# Altium schematic symbol library Ic%.SchLib: 452 symbols (part 10 of 12)
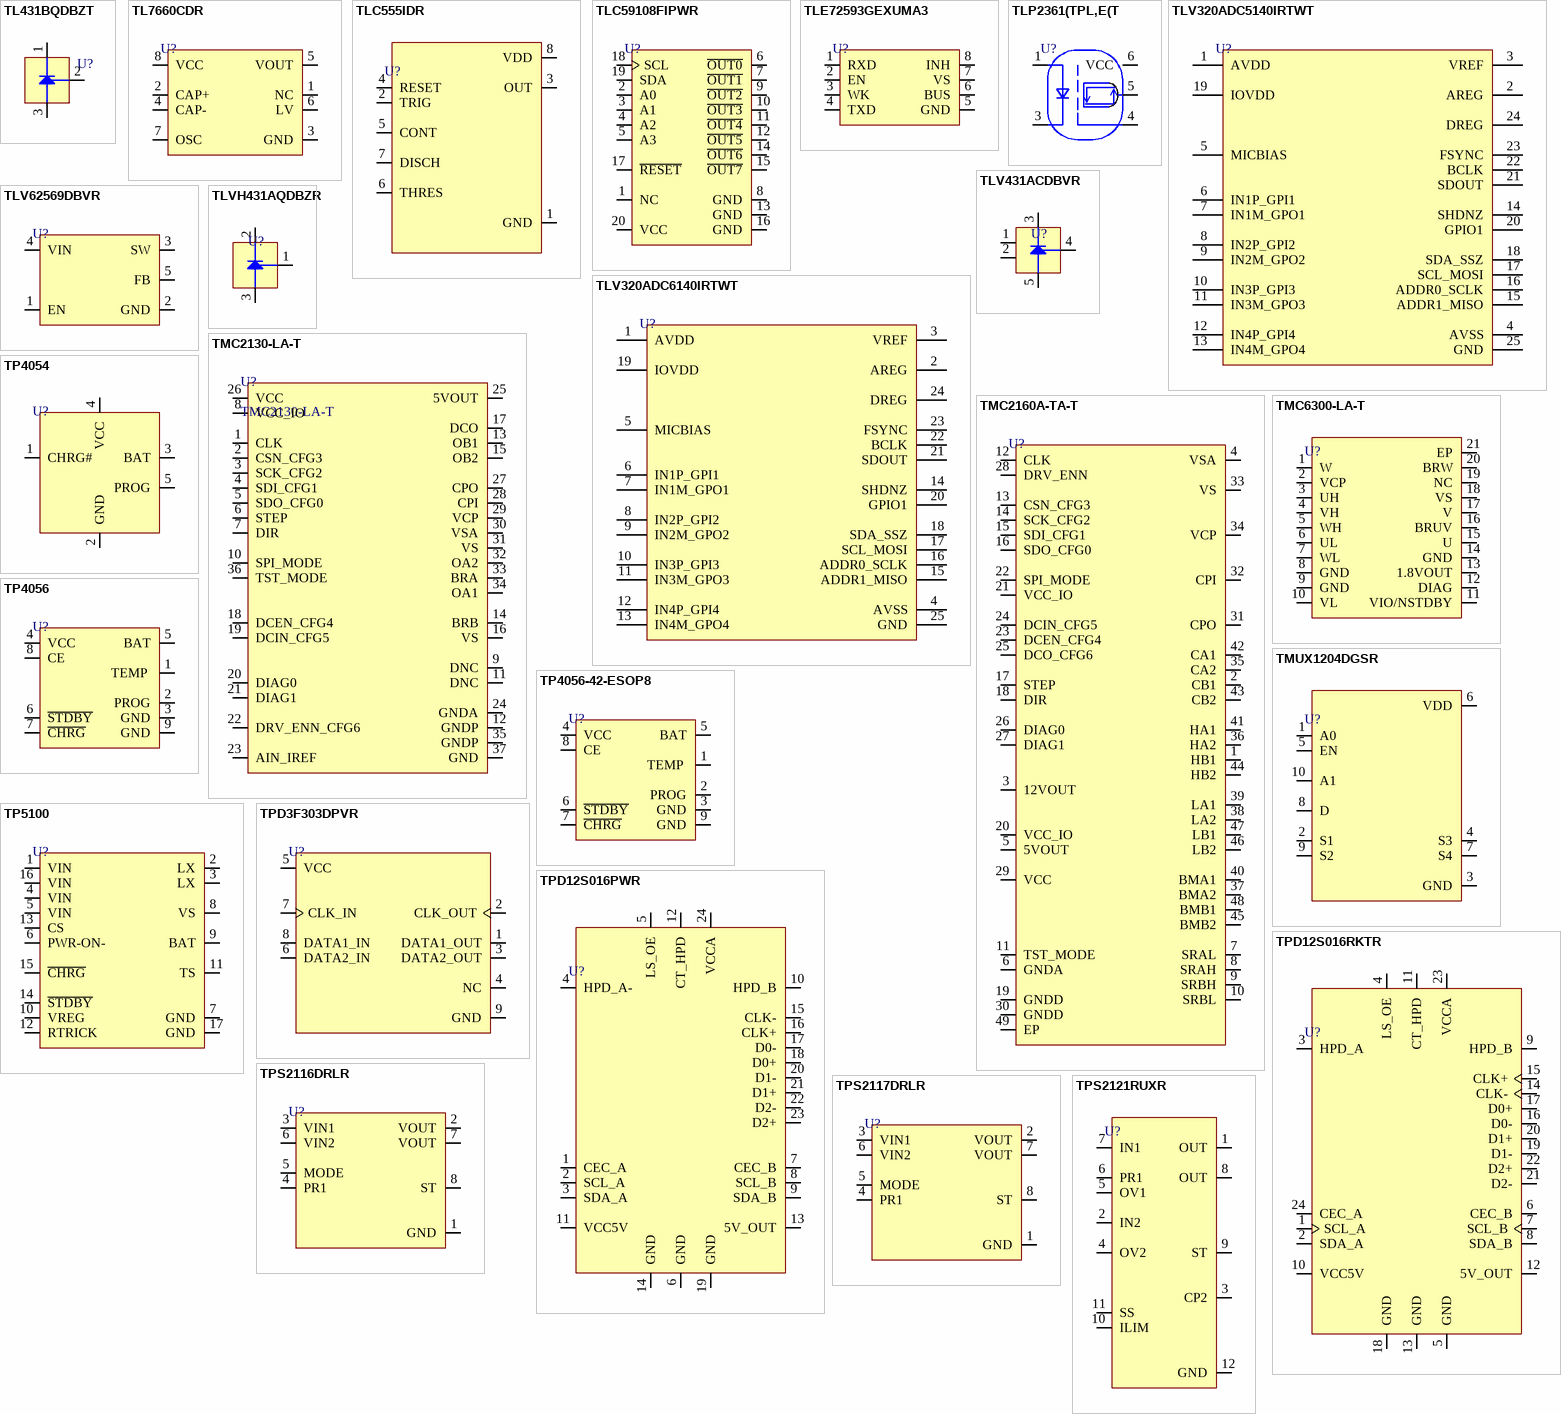
[diagram p32: symbols TL431BQDBZT to TPS2121RUXR]

## TL431BQDBZT
designator U?
IC VREF SHUNT ADJ 0.5% SOT23-3; Manufacturer: Texas Instruments; Manufacturer Part Number: TL431BQDBZT; Max Supply Voltage: 37V; Output Voltage: 36V; Max Output current: 100mA; Min Output Voltage: 2.495V; Cathode Current: 700uA; Temperature Coefficient: 92ppm/°C; Reference Type: Shunt,Adjustable; Output Type: Adjustable; Supplier: Mouser; LCSC Part Number: C2864384; RoHS: Yes; Item Type: IC; Stock: 34135; Pricing: 1=0.88, 10=0.633, 50=0.57, 100=0.501, 1000=0.415, 10000=0.397 (USD); Case/Package: SOT-23-3; Pins: 3; Min Operating Temperature: -40°C; Max Operating Temperature: 125°C; Tolerance: 0.5%; Packaging: Tape and Reel; Package Quantity: 250; Max Output Voltage: 36V; Output Current: 100mA; Series: -; Reference Voltage: 36V; Thickness: 1mm; Radiation Hardening: No; Lead Free: Lead Free; RoHS Compliant: Yes; ComponentLink1URL: https://datasheet.ciiva.com/15148/getdatasheetpartid-48480-15148279.pdf?src-supplier=Verical; ComponentLink1Description: https://datasheet.ciiva.com/15148/getdatasheetpartid-48480-15148279.pdf?src-supplier=Verical; ComponentLink2URL: https://datasheet.ciiva.com/2012/tl431a-2012112.pdf?src-supplier=Digikey; ComponentLink2Description: https://datasheet.ciiva.com/2012/tl431a-2012112.pdf?src-supplier=Digikey; ComponentLink3URL: https://datasheet.ciiva.com/2012/tl431a-2012111.pdf?src-supplier=Digikey; ComponentLink3Description: https://datasheet.ciiva.com/2012/tl431a-2012111.pdf?src-supplier=Digikey; ComponentLink4URL: https://datasheet.ciiva.com/2012/tl431a-2012113.pdf?src-supplier=Digikey; ComponentLink4Description: https://datasheet.ciiva.com/2012/tl431a-2012113.pdf?src-supplier=Digikey; ComponentLink5URL: https://datasheet.ciiva.com/14366/tl432b-14366103.pdf?src-supplier=Avnet; ComponentLink5Description: https://datasheet.ciiva.com/14366/tl432b-14366103.pdf?src-supplier=Avnet
footprint SOT-23 (TRANS NPN 40V 0.6A SOT23)
pins: 1 Cathode, 2 REF, 3 Anode

## TL7660CDR
designator U?
Charge Pump INV/STPUP/STPDN -1.5V to -10V 100mA 8-Pin SOIC T/R / IC REG SWITCHD CAP INV 8SOIC; Manufacturer: Texas Instruments; Manufacturer Part Number: TL7660CDR; Supplier: Digi-Key; Supplier Part Number: 296-21856-1-ND; RoHS: Yes; Category: Voltage Regulators - Switching; Stock: 5011; Pricing: 1=1.15, 10=1.024, 25=0.9716, 100=0.798, 250=0.746, 500=0.65926, 1000=0.52046 (USD); ComponentLink1URL: https://datasheet.ciiva.com/15114/getdatasheetpartid-314156-15114111.pdf?src-supplier=Verical; ComponentLink1Description: https://datasheet.ciiva.com/15114/getdatasheetpartid-314156-15114111.pdf?src-supplier=Verical; ComponentLink2URL: https://datasheet.ciiva.com/2033/tl7660-2033856.pdf?src-supplier=Digi-Key; ComponentLink2Description: https://datasheet.ciiva.com/2033/tl7660-2033856.pdf?src-supplier=Digi-Key; ComponentLink3URL: https://datasheet.ciiva.com/41462/001014582-da-01-en-ic-reg-multi-config-tl7660cdr-soic-8-tid-41462430.pdf?src-supplier=Conrad; ComponentLink3Description: https://datasheet.ciiva.com/41462/001014582-da-01-en-ic-reg-multi-config-tl7660cdr-soic-8-tid-41462430.pdf?src-supplier=Conrad; ComponentLink4URL: https://datasheet.ciiva.com/3216/tl7660-3216343.pdf?src-supplier=Avnet; ComponentLink4Description: https://datasheet.ciiva.com/3216/tl7660-3216343.pdf?src-supplier=Avnet; ComponentLink5URL: https://datasheet.ciiva.com/2033/tl7660-2033857.pdf?src-supplier=Digi-Key; ComponentLink5Description: https://datasheet.ciiva.com/2033/tl7660-2033857.pdf?src-supplier=Digi-Key; ComponentLink6URL: https://datasheet.ciiva.com/2033/tl7660-2033858.pdf?src-supplier=Digi-Key; ComponentLink6Description: https://datasheet.ciiva.com/2033/tl7660-2033858.pdf?src-supplier=Digi-Key; LCSC Part Number: C130206; Item Type: IC
footprint SOIC-8(0.154", 3.90mm Width)
pins: 1 NC, 2 CAP+, 3 GND, 4 CAP-, 5 VOUT, 6 LV, 7 OSC, 8 VCC

## TLC555IDR
designator U?
IC OSC SGL TIMER 2.1MHZ 8-SOIC; Manufacturer: Texas Instruments; Manufacturer Part Number: TLC555IDR; Min Supply Voltage: 2V; Max Supply Voltage: 15V; Max Power Dissipation: 725mW; Number of Timers/Counters: 1; Operating Supply Current: 360uA; High Level Output Current: -10mA; Low Level Output Current: 100mA; Quiescent Current: 250uA; Supplier: Mouser; LCSC Part Number: C6987; RoHS: Yes; Item Type: IC; Stock: 287; Pricing: 1=0.73, 10=0.518, 50=0.465, 100=0.408, 1000=0.344, 10000=0.275 (USD); Mounting Technology: Surface Mount; Case/Package: SOIC; Pins: 8; Weight: 0.002561oz; Min Operating Temperature: -40°C; Max Operating Temperature: 125°C; Packaging: Tape and Reel; Frequency: 2.1MHz; Package Quantity: 2500; Series: LinCMOS™; Power Dissipation: 725mW; Length: 4.9mm; Width: 3.91mm; Height: 1.58mm; Thickness: 1.58mm; Radiation Hardening: No; Lead Free: Lead Free; RoHS Compliant: Yes; Reach SVHC Compliant: No; ComponentLink1URL: https://datasheet.ciiva.com/4772/slfs043f-205695-4772689.pdf?src-supplier=Mouser; ComponentLink1Description: https://datasheet.ciiva.com/4772/slfs043f-205695-4772689.pdf?src-supplier=Mouser; ComponentLink2URL: https://datasheet.ciiva.com/1233/tlc555-1233330.pdf?src-supplier=Digikey; ComponentLink2Description: https://datasheet.ciiva.com/1233/tlc555-1233330.pdf?src-supplier=Digikey; ComponentLink3URL: https://datasheet.ciiva.com/1233/tlc555-1233329.pdf?src-supplier=Digikey; ComponentLink3Description: https://datasheet.ciiva.com/1233/tlc555-1233329.pdf?src-supplier=Digikey; ComponentLink4URL: https://datasheet.ciiva.com/1233/tlc555-1233331.pdf?src-supplier=Digikey; ComponentLink4Description: https://datasheet.ciiva.com/1233/tlc555-1233331.pdf?src-supplier=Digikey; ComponentLink5URL: https://datasheet.ciiva.com/1492/1834067-1492588.pdf?src-supplier=Element14; ComponentLink5Description: https://datasheet.ciiva.com/1492/1834067-1492588.pdf?src-supplier=Element14; ComponentLink6URL: https://datasheet.ciiva.com/14274/tlc555-14274507.pdf?src-supplier=Avnet; ComponentLink6Description: https://datasheet.ciiva.com/14274/tlc555-14274507.pdf?src-supplier=Avnet
footprint SOIC-8(0.154", 3.90mm Width)
pins: 1 GND, 2 TRIG, 3 OUT, 4 RESET, 5 CONT, 6 THRES, 7 DISCH, 8 VDD

## TLC59108FIPWR
designator U?
IC LED DRVR LINEAR 120MA 20TSSOP; Manufacturer: Texas Instruments; Manufacturer Part Number: TLC59108FIPWR; Supplier: Mouser; LCSC Part Number: C2678527; RoHS: Yes; Item Type: IC; Stock: 2546; Pricing: 1=1.8, 10=1.62, 50=1.62, 100=1.3, 1000=0.882, 10000=0.76 (USD); ComponentLink1URL: https://datasheet.ciiva.com/15136/getdatasheetpartid-186119-15136035.pdf?src-supplier=Verical; ComponentLink1Description: https://datasheet.ciiva.com/15136/getdatasheetpartid-186119-15136035.pdf?src-supplier=Verical; ComponentLink2URL: https://datasheet.ciiva.com/1945/tlc59108f-1945732.pdf?src-supplier=Digikey; ComponentLink2Description: https://datasheet.ciiva.com/1945/tlc59108f-1945732.pdf?src-supplier=Digikey; ComponentLink3URL: https://datasheet.ciiva.com/3165/tlc59108f-3165330.pdf?src-supplier=Avnet; ComponentLink3Description: https://datasheet.ciiva.com/3165/tlc59108f-3165330.pdf?src-supplier=Avnet; ComponentLink4URL: https://datasheet.ciiva.com/1945/tlc59108f-1945733.pdf?src-supplier=Digikey; ComponentLink4Description: https://datasheet.ciiva.com/1945/tlc59108f-1945733.pdf?src-supplier=Digikey; ComponentLink5URL: https://datasheet.ciiva.com/1945/tlc59108f-1945734.pdf?src-supplier=Digikey; ComponentLink5Description: https://datasheet.ciiva.com/1945/tlc59108f-1945734.pdf?src-supplier=Digikey
footprint TSSOP-20
pins: 1 NC "No internal connection", 2 A0 "Address input 0", 3 A1 "Address input 1", 4 A2 "Address input 2", 5 A3 "Address input 3", 6 ~{OUT0} "Constant current output 0, LED ON at low", 7 ~{OUT1} "Constant current output 1, LED ON at low", 8 GND "Ground", 9 ~{OUT2} "Constant current output 2, LED ON at low", 10 ~{OUT3} "Constant current output 3, LED ON at low", 11 ~{OUT4} "Constant current output 4, LED ON at low", 12 ~{OUT5} "Constant current output 5, LED ON at low", 13 GND "Ground", 14 ~{OUT6} "Constant current output 6, LED ON at low", 15 ~{OUT7} "Constant current output 7, LED ON at low", 16 GND "Ground", 17 ~{RESET} "Active-low reset input", 18 SCL "Serial clock input", 19 SDA "Serial data input/output", 20 VCC "Power supply"

## TLE72593GEXUMA3
designator U?
IC TRANSCEIVER 1/1 PGDSO816; Manufacturer: Infineon; Manufacturer Part Number: TLE72593GEXUMA3; Operating Supply Voltage: 3.3V; Data Rate: 20Kbps; Receiver Hysteresis: 120mV; Quiescent Current: 10A; Supplier: Mouser; LCSC Part Number: 726-TLE72593GEXUMA3; RoHS: Yes; Item Type: IC; Stock: 3950; Pricing: 1=1.75, 10=1.17, 50=1.05, 100=0.88, 1000=0.608, 10000=0.608 (USD); Mounting Technology: Surface Mount; Case/Package: SOIC; Pins: 8; Min Operating Temperature: -40°C; Max Operating Temperature: 150°C; Packaging: Cut Tape; Package Quantity: 2500NUMBER; Series: -; RoHS Compliant: Yes; Lead Free: Lead Free; Halogen Free: Halogen Free
footprint SOIC-8(0.154", 3.90mm Width)
pins: 1 RXD, 2 EN, 3 WK, 4 TXD, 5 GND, 6 BUS, 7 VS, 8 INH

## TLP2361(TPL,E(T
designator U?
15Mbit/s 80ns 2.7V~5.5V 20kV/us DC SO-5 Logic Output Optoisolators ROHS; Manufacturer: Toshiba; Manufacturer Part Number: TLP2361(TPL,E(T; Supplier: Arrow Electronics; LCSC Part Number: C107626; RoHS: No; Stock: 15000; Pricing: 3000=0.3233, 6000=0.3199, 9000=0.3167, 12000=0.3136, 15000=0.3102, 30000=0.3071 (USD); ComponentLink1URL: https://datasheet.octopart.com/TLP2361%28TPL%2CE%28T-Toshiba-datasheet-62094047.pdf?src-supplier=TME; ComponentLink1Description: https://datasheet.octopart.com/TLP2361%28TPL%2CE%28T-Toshiba-datasheet-62094047.pdf?src-supplier=TME; Item Type: Optoisolator
footprint SO-5
pins: 1 AN, 3 CAT, 4 GND, 5 VO, 6 VCC

## TLV320ADC5140IRTWT
designator U?
IC ADC AUDIO 768K 24WQFN; Manufacturer: Texas Instruments; Manufacturer Part Number: TLV320ADC5140IRTWT; Supplier 1: Digi-Key; RoHS: Yes; Stock 1: 40; Pricing 1: 1=6.07000, 10=5.44900, 25=5.15160, 100=4.46470 (USD); RoHS Compliant: Yes; ComponentLink1URL: http://www.ti.com/general/docs/suppproductinfo.tsp?distId=10&amp;gotoUrl=http%3A%2F%2Fwww.ti.com%2Flit%2Fgpn%2Ftlv320adc5140&src-supplier=Digi-Key; ComponentLink1Description: http://www.ti.com/general/docs/suppproductinfo.tsp?distId=10&amp;gotoUrl=http%3A%2F%2Fwww.ti.com%2Flit%2Fgpn%2Ftlv320adc5140&src-supplier=Digi-Key; Supplier Part Number 1: 296-TLV320ADC5140IRTWTCT-ND; LCSC Part Number: C1852018; Item Type: IC
footprint 24-WQFN (4x4)
pins: 1 AVDD, 2 AREG, 3 VREF, 4 AVSS, 5 MICBIAS, 6 IN1P_GPI1, 7 IN1M_GPO1, 8 IN2P_GPI2, 9 IN2M_GPO2, 10 IN3P_GPI3, 11 IN3M_GPO3, 12 IN4P_GPI4, 13 IN4M_GPO4, 14 SHDNZ, 15 ADDR1_MISO, 16 ADDR0_SCLK, 17 SCL_MOSI, 18 SDA_SSZ, 19 IOVDD, 20 GPIO1, 21 SDOUT, 22 BCLK, 23 FSYNC, 24 DREG, 25 GND

## TLV320ADC6140IRTWT
designator U?
IC ADC AUDIO 768K 24WQFN; Manufacturer: Texas Instruments; Manufacturer Part Number: TLV320ADC6140IRTWT; Supplier 1: Digi-Key; RoHS: Yes; Category: Amplifiers - Audio; Stock 1: 4324; Pricing 1: 1=13.36000, 10=12.27500, 25=11.76600, 100=10.36680 (USD); ComponentLink1URL: http://www.ti.com/general/docs/suppproductinfo.tsp?distId=10&amp;gotoUrl=http%3A%2F%2Fwww.ti.com%2Flit%2Fgpn%2Ftlv320adc6140&src-supplier=Digi-Key; ComponentLink1Description: http://www.ti.com/general/docs/suppproductinfo.tsp?distId=10&amp;gotoUrl=http%3A%2F%2Fwww.ti.com%2Flit%2Fgpn%2Ftlv320adc6140&src-supplier=Digi-Key; Supplier Part Number 1: 296-TLV320ADC6140IRTWTCT-ND; LCSC Part Number: C1852023; Item Type: IC
footprint 24-WQFN (4x4)
pins: 1 AVDD, 2 AREG, 3 VREF, 4 AVSS, 5 MICBIAS, 6 IN1P_GPI1, 7 IN1M_GPO1, 8 IN2P_GPI2, 9 IN2M_GPO2, 10 IN3P_GPI3, 11 IN3M_GPO3, 12 IN4P_GPI4, 13 IN4M_GPO4, 14 SHDNZ, 15 ADDR1_MISO, 16 ADDR0_SCLK, 17 SCL_MOSI, 18 SDA_SSZ, 19 IOVDD, 20 GPIO1, 21 SDOUT, 22 BCLK, 23 FSYNC, 24 DREG, 25 GND

## TLV431ACDBVR
designator U?
IC VREF SHUNT ADJ 1% SOT23-5; Manufacturer: Texas Instruments; Manufacturer Part Number: TLV431ACDBVR; Output Voltage: 6V; Max Supply Voltage: 7V; Max Output current: 15mA; Temperature Coefficient: 129ppm/°C; Cathode Current: 80uA; Min Output Voltage: 1.24V; Reference Type: Shunt,Adjustable; Output Type: Adjustable; Supplier: Mouser; LCSC Part Number: C60268; RoHS: Yes; Item Type: IC; Stock: 321; Pricing: 1=0.47, 10=0.394, 50=0.394, 100=0.295, 1000=0.179, 10000=0.139 (USD); Case/Package: SOT-23-5; Pins: 5; Weight: 0.000557oz; Min Operating Temperature: -40°C; Max Operating Temperature: 125°C; Packaging: Tape and Reel; Tolerance: 1%; Max Output Voltage: 6V; Output Current: 15mA; Series: -; Min Input Voltage: 1.24V; Reference Voltage: 6V; Termination: SMD/SMT; Radiation Hardening: No; Lead Free: Lead Free; RoHS Compliant: Yes; Reach SVHC Compliant: No; ComponentLink1URL: https://datasheet.ciiva.com/22698/1837046-22698668.pdf?src-supplier=Element14; ComponentLink1Description: https://datasheet.ciiva.com/22698/1837046-22698668.pdf?src-supplier=Element14; ComponentLink2URL: https://datasheet.ciiva.com/27049/761694-27049832.pdf?src-supplier=Jameco; ComponentLink2Description: https://datasheet.ciiva.com/27049/761694-27049832.pdf?src-supplier=Jameco; ComponentLink3URL: https://datasheet.ciiva.com/46383/1887487-46383135.pdf?src-supplier=Element14; ComponentLink3Description: https://datasheet.ciiva.com/46383/1887487-46383135.pdf?src-supplier=Element14; ComponentLink4URL: https://datasheet.ciiva.com/2006/tlv431a-2006237.pdf?src-supplier=Digikey; ComponentLink4Description: https://datasheet.ciiva.com/2006/tlv431a-2006237.pdf?src-supplier=Digikey; ComponentLink5URL: https://datasheet.ciiva.com/2006/tlv431a-2006236.pdf?src-supplier=Digikey; ComponentLink5Description: https://datasheet.ciiva.com/2006/tlv431a-2006236.pdf?src-supplier=Digikey; ComponentLink6URL: https://datasheet.ciiva.com/2006/tlv431a-2006238.pdf?src-supplier=Digikey; ComponentLink6Description: https://datasheet.ciiva.com/2006/tlv431a-2006238.pdf?src-supplier=Digikey
footprint SOT-23-5
pins: 1 NC, 2 NC, 3 K, 4 K, 5 A

## TLV62569DBVR
designator U?
IC REG BUCK ADJ 2A SOT23-5; Manufacturer: Texas Instruments; Manufacturer Part Number: TLV62569DBVR; Supplier: Mouser; LCSC Part Number: C141836; RoHS: Yes; Item Type: IC; Stock: 6385; Pricing: 1=0.47, 10=0.248, 50=0.248, 100=0.143, 1000=0.12, 10000=0.086 (USD); ComponentLink1URL: http://www.ti.com/lit/ds/symlink/tlv62569.pdf?src-supplier=Farnell; ComponentLink1Description: http://www.ti.com/lit/ds/symlink/tlv62569.pdf?src-supplier=Farnell; ComponentLink2URL: http://www.ti.com/lit/ds/symlink/tlv62569.pdf?src-supplier=Digikey; ComponentLink2Description: http://www.ti.com/lit/ds/symlink/tlv62569.pdf?src-supplier=Digikey
footprint SOT-23-5
pins: 1 EN, 2 GND, 3 SW, 4 VIN, 5 FB

## TLVH431AQDBZR
designator U?
IC VREF SHUNT ADJ 1% SOT23-3; Manufacturer: Texas Instruments; Manufacturer Part Number: TLVH431AQDBZR; Supplier: Mouser; Supplier Part Number: 595-TLVH431AQDBZR; RoHS: Yes; LCSC Part Number: C109228; Stock: 64111; Pricing: 1=0.7, 10=0.576, 50=0.576, 100=0.437, 1000=0.297, 10000=0.23 (USD); ComponentLink1URL: https://datasheet.ciiva.com/2006/tlvh431a-2006852.pdf?src-supplier=Digikey; ComponentLink1Description: https://datasheet.ciiva.com/2006/tlvh431a-2006852.pdf?src-supplier=Digikey; ComponentLink2URL: https://datasheet.ciiva.com/2006/tlvh431a-2006853.pdf?src-supplier=Digikey; ComponentLink2Description: https://datasheet.ciiva.com/2006/tlvh431a-2006853.pdf?src-supplier=Digikey; ComponentLink3URL: https://datasheet.ciiva.com/2006/tlvh431a-2006854.pdf?src-supplier=Digikey; ComponentLink3Description: https://datasheet.ciiva.com/2006/tlvh431a-2006854.pdf?src-supplier=Digikey; ComponentLink4URL: https://datasheet.ciiva.com/30001/tlvh432b-30001871.pdf?src-supplier=Avnet; ComponentLink4Description: https://datasheet.ciiva.com/30001/tlvh432b-30001871.pdf?src-supplier=Avnet; Item Type: IC
footprint SOT-23 (TRANS NPN 40V 0.6A SOT23)
pins: 1 REF, 2 Cathode, 3 Anode

## TMC2130-LA-T
designator U?
IC STEPPER MOTOR DVR SPI 36QFN; Manufacturer: Trinamic; Logic Function: AND GATE; Output Current: 1.4A; Supplier 1: Mouser; Manufacturer Part Number: TMC2130-LA-T; RoHS: Yes; Category: Motor Drivers; Stock 1: 19660; Pricing 1: 1=5.61000, 10=4.76000, 50=4.76000, 100=4.01000, 250=3.70000, 500=3.45000, 1000=2.90000, 2000=2.83000, 10000=2.83000 (USD); Mount: Surface Mount; Case/Package: QFN; Min Operating Temperature: -40°C; Max Operating Temperature: 125°C; Packaging: Tape and Reel; Interface: SPI; ComponentLink1URL: https://www.trinamic.com/fileadmin/assets/Products/ICs_Documents/TMC2130_datasheet.pdf?src-supplier=Digi-Key; ComponentLink1Description: https://www.trinamic.com/fileadmin/assets/Products/ICs_Documents/TMC2130_datasheet.pdf?src-supplier=Digi-Key; Supplier Part Number 1: 700-TMC2130-LA-T
footprint TMC2130-LA-T
pins: 1 CLK, 2 CSN_CFG3, 3 SCK_CFG2, 4 SDI_CFG1, 5 SDO_CFG0, 6 STEP, 7 DIR, 8 VCC_IO, 9 DNC, 10 SPI_MODE, 11 DNC, 12 GNDP, 13 OB1, 14 BRB, 15 OB2, 16 VS, 17 DCO, 18 DCEN_CFG4, 19 DCIN_CFG5, 20 DIAG0, 21 DIAG1, 22 DRV_ENN_CFG6, 23 AIN_IREF, 24 GNDA, 25 5VOUT, 26 VCC, 27 CPO, 28 CPI, 29 VCP, 30 VSA, 31 VS, 32 OA2, 33 BRA, 34 OA1, 35 GNDP, 36 TST_MODE, 37 GND

## TMC2160A-TA-T
designator U?
IC MTR DRV BIPOLAR 10-50V 48TQFP; Manufacturer: Trinamic; Manufacturer Part Number: TMC2160A-TA-T; Supplier: Mouser; Supplier Part Number: 700-TMC2160A-TA-T; RoHS: Yes; Stock: 9328; Pricing: 1=6.21, 10=5.28, 50=5.28, 100=4.57, 1000=3.48, 10000=3.11 (USD); LCSC Part Number: C465948; Item Type: IC
footprint 48-TQFP-EP(7x7)
pins: 1 HB1, 2 CB1, 3 12VOUT, 4 VSA, 5 5VOUT, 6 GNDA, 7 SRAL, 8 SRAH, 9 SRBH, 10 SRBL, 11 TST_MODE, 12 CLK, 13 CSN_CFG3, 14 SCK_CFG2, 15 SDI_CFG1, 16 SDO_CFG0, 17 STEP, 18 DIR, 19 GNDD, 20 VCC_IO, 21 VCC_IO, 22 SPI_MODE, 23 DCEN_CFG4, 24 DCIN_CFG5, 25 DCO_CFG6, 26 DIAG0, 27 DIAG1, 28 DRV_ENN, 29 VCC, 30 GNDD, 31 CPO, 32 CPI, 33 VS, 34 VCP, 35 CA2, 36 HA2, 37 BMA2, 38 LA2, 39 LA1, 40 BMA1, 41 HA1, 42 CA1, 43 CB2, 44 HB2, 45 BMB2, 46 LB2, 47 LB1, 48 BMB1, 49 EP

## TMC6300-LA-T
designator U?
BLDC MOTOR DRIVER 2-11V QFN20; Manufacturer: Trinamic; Manufacturer Part Number: TMC6300-LA-T; Item Type: IC; Supplier: Mouser; LCSC Part Number: C5274455; RoHS: No; Pricing: 1=3.73, 10=2.47, 50=2.11, 100=1.71, 1000=1.28, 10000=1.15 (USD); Series: -
footprint 20-QFN(3x3)
pins: 1 W, 2 VCP, 3 UH, 4 VH, 5 WH, 6 UL, 7 WL, 8 GND, 9 GND, 10 VL, 11 VIO/NSTDBY, 12 DIAG, 13 1.8VOUT, 14 GND, 15 U, 16 BRUV, 17 V, 18 VS, 19 NC, 20 BRW, 21 EP

## TMUX1204DGSR
designator U?
IC SWITCH SP4T X 1 5OHM 10VSSOP; Manufacturer: Texas Instruments; Manufacturer Part Number: TMUX1204DGSR; Supplier: Mouser; Supplier Part Number: 595-TMUX1204DGSR; RoHS: Yes; Item Type: IC; Stock: 10828; Pricing: 1=0.94, 10=0.776, 50=0.776, 100=0.589, 1000=0.401, 10000=0.325 (USD); ComponentLink1URL: http://www.ti.com/general/docs/suppproductinfo.tsp?distId=10&amp;gotoUrl=http%3A%2F%2Fwww.ti.com%2Flit%2Fgpn%2Ftmux1204&src-supplier=Digikey; ComponentLink1Description: http://www.ti.com/general/docs/suppproductinfo.tsp?distId=10&amp;gotoUrl=http%3A%2F%2Fwww.ti.com%2Flit%2Fgpn%2Ftmux1204&src-supplier=Digikey; LCSC Part Number: C2840022
footprint VSSOP-10
pins: 1 A0, 2 S1, 3 GND, 4 S3, 5 EN, 6 VDD, 7 S4, 8 D, 9 S2, 10 A1

## TP4054
designator U?
4.5V~5.5V 锂离子/Polymer 1 600mA SOT-23-5 Battery Management ICs ROHS; Manufacturer: TPOWER; Manufacturer Part Number: TP4054; Item Type: IC; Package: SOT-23-5; LCSC Part Number: C382138; ComponentLink1Description: LCSC; ComponentLink1URL: https://www.lcsc.com/product-detail/Battery-Management-ICs_TPOWER-TP4054_C382138.html
footprint SOT-23-5
pins: 1 CHRG#, 2 GND, 3 BAT, 4 VCC, 5 PROG

## TP4056
designator U?
3.7V~6.5V Lithium-ion 1 1000mA ESOP-8 Battery Management ROHS; Manufacturer: UMW(Youtai Semiconductor Co., Ltd.); Manufacturer Part Number: TP4056; Item Type: IC; Package: ESOP-8; LCSC Part Number: C725790; ComponentLink1Description: LCSC; ComponentLink1URL: https://www.lcsc.com/product-detail/Battery-Management_UMW-Youtai-Semiconductor-Co-Ltd-TP4056_C725790.html?s_z=n_TP4056
footprint ESOP-8
pins: 1 TEMP , 2 PROG, 3 GND, 4 VCC, 5 BAT, 6 ~{STDBY}, 7 ~{CHRG}, 8 CE, 9 GND

## TP4056-42-ESOP8
designator U?
ESOP-8 Battery Management ICs ROHS; Manufacturer: TOPPOWER; Manufacturer Part Number: TP4056-42-ESOP8; Item Type: IC; Package: ESOP-8; LCSC Part Number: C16581; ComponentLink1Description: LCSC; ComponentLink1URL: https://www.lcsc.com/product-detail/Battery-Management-ICs_TOPPOWER-Nanjing-Extension-Microelectronics-TP4056-42-ESOP8_C16581.html
footprint ESOP-8
pins: 1 TEMP , 2 PROG, 3 GND, 4 VCC, 5 BAT, 6 ~{STDBY}, 7 ~{CHRG}, 8 CE, 9 GND

## TP5100
designator U?
TQFN-16-EP(4x4) Battery Management ICs ROHS; Manufacturer: TOPPOWER(Nanjing Extension Microelectronics); Manufacturer Part Number: TP5100; Item Type: IC; Package: TQFN-16-EP(4x4); LCSC Part Number: C379389; ComponentLink1Description: LCSC; ComponentLink1URL: https://www.lcsc.com/product-detail/Battery-Management-ICs_TOPPOWER-Nanjing-Extension-Microelectronics-TP5100_C379389.html
footprint TQFN-16-EP(4x4)_
pins: 1 VIN, 2 LX, 3 LX, 4 VIN, 5 VIN, 6 PWR-ON-, 7 GND, 8 VS, 9 BAT, 10 VREG, 11 TS, 12 RTRICK, 13 CS, 14 ~{STDBY}, 15 ~{CHRG}, 16 VIN, 17 GND

## TPD3F303DPVR
designator U?
FILTER RC(PI) ESD SMD; Manufacturer: Texas Instruments; Manufacturer Part Number: TPD3F303DPVR; Item Type: IC; Breakdown Voltage: 6V; Supplier: Mouser; LCSC Part Number: C2865991; RoHS: Yes; Stock: 4350; Pricing: 1=0.7, 10=0.496, 50=0.496, 100=0.43, 1000=0.366, 10000=0.29 (USD); Thickness: 580um; Lead Free: 5697LeadFree; ComponentLink1URL: https://datasheet.ciiva.com/6213/tpd3f303-6213201.pdf?src-supplier=Digikey; ComponentLink1Description: https://datasheet.ciiva.com/6213/tpd3f303-6213201.pdf?src-supplier=Digikey; ComponentLink2URL: https://datasheet.ciiva.com/15162/getdatasheetpartid-302817-15162475.pdf?src-supplier=Verical; ComponentLink2Description: https://datasheet.ciiva.com/15162/getdatasheetpartid-302817-15162475.pdf?src-supplier=Verical; ComponentLink3URL: https://datasheet.ciiva.com/6213/tpd3f303-6213194.pdf?src-supplier=Digikey; ComponentLink3Description: https://datasheet.ciiva.com/6213/tpd3f303-6213194.pdf?src-supplier=Digikey; ComponentLink4URL: https://datasheet.ciiva.com/6213/tpd3f303-6213198.pdf?src-supplier=Digikey; ComponentLink4Description: https://datasheet.ciiva.com/6213/tpd3f303-6213198.pdf?src-supplier=Digikey; ComponentLink5URL: https://datasheet.ciiva.com/1167/1558442-1167933.pdf?src-supplier=Element14; ComponentLink5Description: https://datasheet.ciiva.com/1167/1558442-1167933.pdf?src-supplier=Element14
footprint USON-8-EP(1.6x2.1)
pins: 1 DATA1_OUT, 2 CLK_OUT, 3 DATA2_OUT, 4 NC, 5 VCC, 6 DATA2_IN, 7 CLK_IN, 8 DATA1_IN, 9 GND

## TPD12S016PWR
designator U?
IC INTERFACE SPECIALIZED 24TSSOP; Manufacturer: Texas Instruments; Manufacturer Part Number: TPD12S016PWR; Supplier: Mouser; Supplier Part Number: 595-TPD12S016PWR; RoHS: Yes; Item Type: IC; Stock: 8312; Pricing: 1=1.23, 10=1.11, 50=1.05, 100=0.863, 1000=0.563, 10000=0.495 (USD); ComponentLink1URL: https://datasheet.ciiva.com/1784/tpd12s016-1784288.pdf?src-supplier=Digi-Key; ComponentLink1Description: https://datasheet.ciiva.com/1784/tpd12s016-1784288.pdf?src-supplier=Digi-Key; ComponentLink2URL: https://datasheet.ciiva.com/1495/1506096-1495817.pdf?src-supplier=Element14; ComponentLink2Description: https://datasheet.ciiva.com/1495/1506096-1495817.pdf?src-supplier=Element14; ComponentLink3URL: https://datasheet.ciiva.com/26911/getdatasheetpartid-349978-26911477.pdf?src-supplier=Verical; ComponentLink3Description: https://datasheet.ciiva.com/26911/getdatasheetpartid-349978-26911477.pdf?src-supplier=Verical; ComponentLink4URL: https://datasheet.ciiva.com/41460/001188042-da-01-en-ic-hdmi-esd-pr-tpd12s016pwr-tssop-24-tid-41460279.pdf?src-supplier=Conrad; ComponentLink4Description: https://datasheet.ciiva.com/41460/001188042-da-01-en-ic-hdmi-esd-pr-tpd12s016pwr-tssop-24-tid-41460279.pdf?src-supplier=Conrad; ComponentLink5URL: https://datasheet.ciiva.com/3149/tpd12s016-3149560.pdf?src-supplier=Avnet; ComponentLink5Description: https://datasheet.ciiva.com/3149/tpd12s016-3149560.pdf?src-supplier=Avnet; LCSC Part Number: C201665
footprint 24-TSSOP
pins: 1 CEC_A, 2 SCL_A, 3 SDA_A, 4 HPD_A-, 5 LS_OE, 6 GND, 7 CEC_B, 8 SCL_B, 9 SDA_B, 10 HPD_B, 11 VCC5V, 12 CT_HPD, 13 5V_OUT, 14 GND, 15 CLK-, 16 CLK+, 17 D0-, 18 D0+, 19 GND, 20 D1-, 21 D1+, 22 D2-, 23 D2+, 24 VCCA

## TPD12S016RKTR
designator U?
IC INTERFACE SPECIALIZED 24UQFN; Manufacturer: Texas Instruments; Manufacturer Part Number: TPD12S016RKTR; Supplier: Mouser; Supplier Part Number: 595-TPD12S016RKTR; RoHS: Yes; Category: Interface ICs; Stock: 5223; Pricing: 1=0.82, 10=0.694, 50=0.694, 100=0.537, 1000=0.443, 10000=0.442 (USD); ComponentLink1URL: https://datasheet.ciiva.com/12545/tpd12s016-108314-12545332.pdf?src-supplier=Mouser; ComponentLink1Description: https://datasheet.ciiva.com/12545/tpd12s016-108314-12545332.pdf?src-supplier=Mouser; ComponentLink2URL: https://datasheet.ciiva.com/14195/tpd12s016-14195158.pdf?src-supplier=Avnet; ComponentLink2Description: https://datasheet.ciiva.com/14195/tpd12s016-14195158.pdf?src-supplier=Avnet; ComponentLink3URL: https://datasheet.ciiva.com/6632/tpd12s016-6632086.pdf?src-supplier=Digikey; ComponentLink3Description: https://datasheet.ciiva.com/6632/tpd12s016-6632086.pdf?src-supplier=Digikey
footprint 24-UQFN (4x2)
pins: 1 SCL_A, 2 SDA_A, 3 HPD_A, 4 LS_OE, 5 GND, 6 CEC_B, 7 SCL_B, 8 SDA_B, 9 HPD_B, 10 VCC5V, 11 CT_HPD, 12 5V_OUT, 13 GND, 14 CLK-, 15 CLK+, 16 D0-, 17 D0+, 18 GND, 19 D1-, 20 D1+, 21 D2-, 22 D2+, 23 VCCA, 24 CEC_A

## TPS2116DRLR
designator U?
1.6-V TO 5.5-V, 40-M, 2.5-A, LOW; Manufacturer: Texas Instruments; Manufacturer Part Number: TPS2116DRLR; Item Type: IC; Supplier: Mouser; Supplier Part Number: 595-TPS2116DRLR; RoHS: No; Category: Voltage Supervisors; Stock: 5096; Pricing: 1=0.87, 10=0.736, 50=0.736, 100=0.565, 1000=0.394, 10000=0.336 (USD); RoHS Compliant: Yes; LCSC Part Number: C3235557
footprint SOT-583
pins: 1 GND, 2 VOUT, 3 VIN1, 4 PR1, 5 MODE, 6 VIN2, 7 VOUT, 8 ST

## TPS2117DRLR
designator U?
1.6-V TO 5.5-V, 20-M, 4-A LOW IQ; Manufacturer: Texas Instruments; Manufacturer Part Number: TPS2117DRLR; Item Type: IC; Supplier: Mouser; Supplier Part Number: 595-TPS2117DRLR; RoHS: No; Stock: 3415; Pricing: 1=1.34, 10=1.2, 50=1.2, 100=0.938, 1000=0.612, 10000=0.522 (USD); Pins: 8; Length: 2.1mm; Width: 1.2mm; Height: 600um; Thickness: 550um
footprint SOT-583
pins: 1 GND, 2 VOUT, 3 VIN1, 4 PR1, 5 MODE, 6 VIN2, 7 VOUT, 8 ST

## TPS2121RUXR
designator U?
PWR MGMT BATTERY MGMT; Manufacturer: Texas Instruments; Manufacturer Part Number: TPS2121RUXR; Max Output current: 4.5A; Supplier: Digikey; Supplier Part Number: 296-53410-1-ND; RoHS: Yes; Category: Power Management ICs; Stock: 8290; Pricing: 1=2.31, 10=2.072, 25=1.9544, 100=1.6651, 250=1.56348, 500=1.36804, 1000=1.13352 (USD); Mounting Technology: Surface Mount; Case/Package: VQFN; Pins: 12; Min Operating Temperature: -40°C; Max Operating Temperature: 125°C; Series: -; Packaging: Cut Tape; RoHS Compliant: Yes; ComponentLink1URL: http://www.ti.com/general/docs/suppproductinfo.tsp?distId=10&amp;gotoUrl=http%3A%2F%2Fwww.ti.com%2Flit%2Fgpn%2Ftps2120&src-supplier=Digikey; ComponentLink1Description: http://www.ti.com/general/docs/suppproductinfo.tsp?distId=10&amp;gotoUrl=http%3A%2F%2Fwww.ti.com%2Flit%2Fgpn%2Ftps2120&src-supplier=Digikey
footprint VQFN-HR-12(2x2.5)
pins: 1 OUT, 2 IN2, 3 CP2, 4 OV2, 5 OV1, 6 PR1, 7 IN1, 8 OUT, 9 ST, 10 ILIM, 11 SS, 12 GND

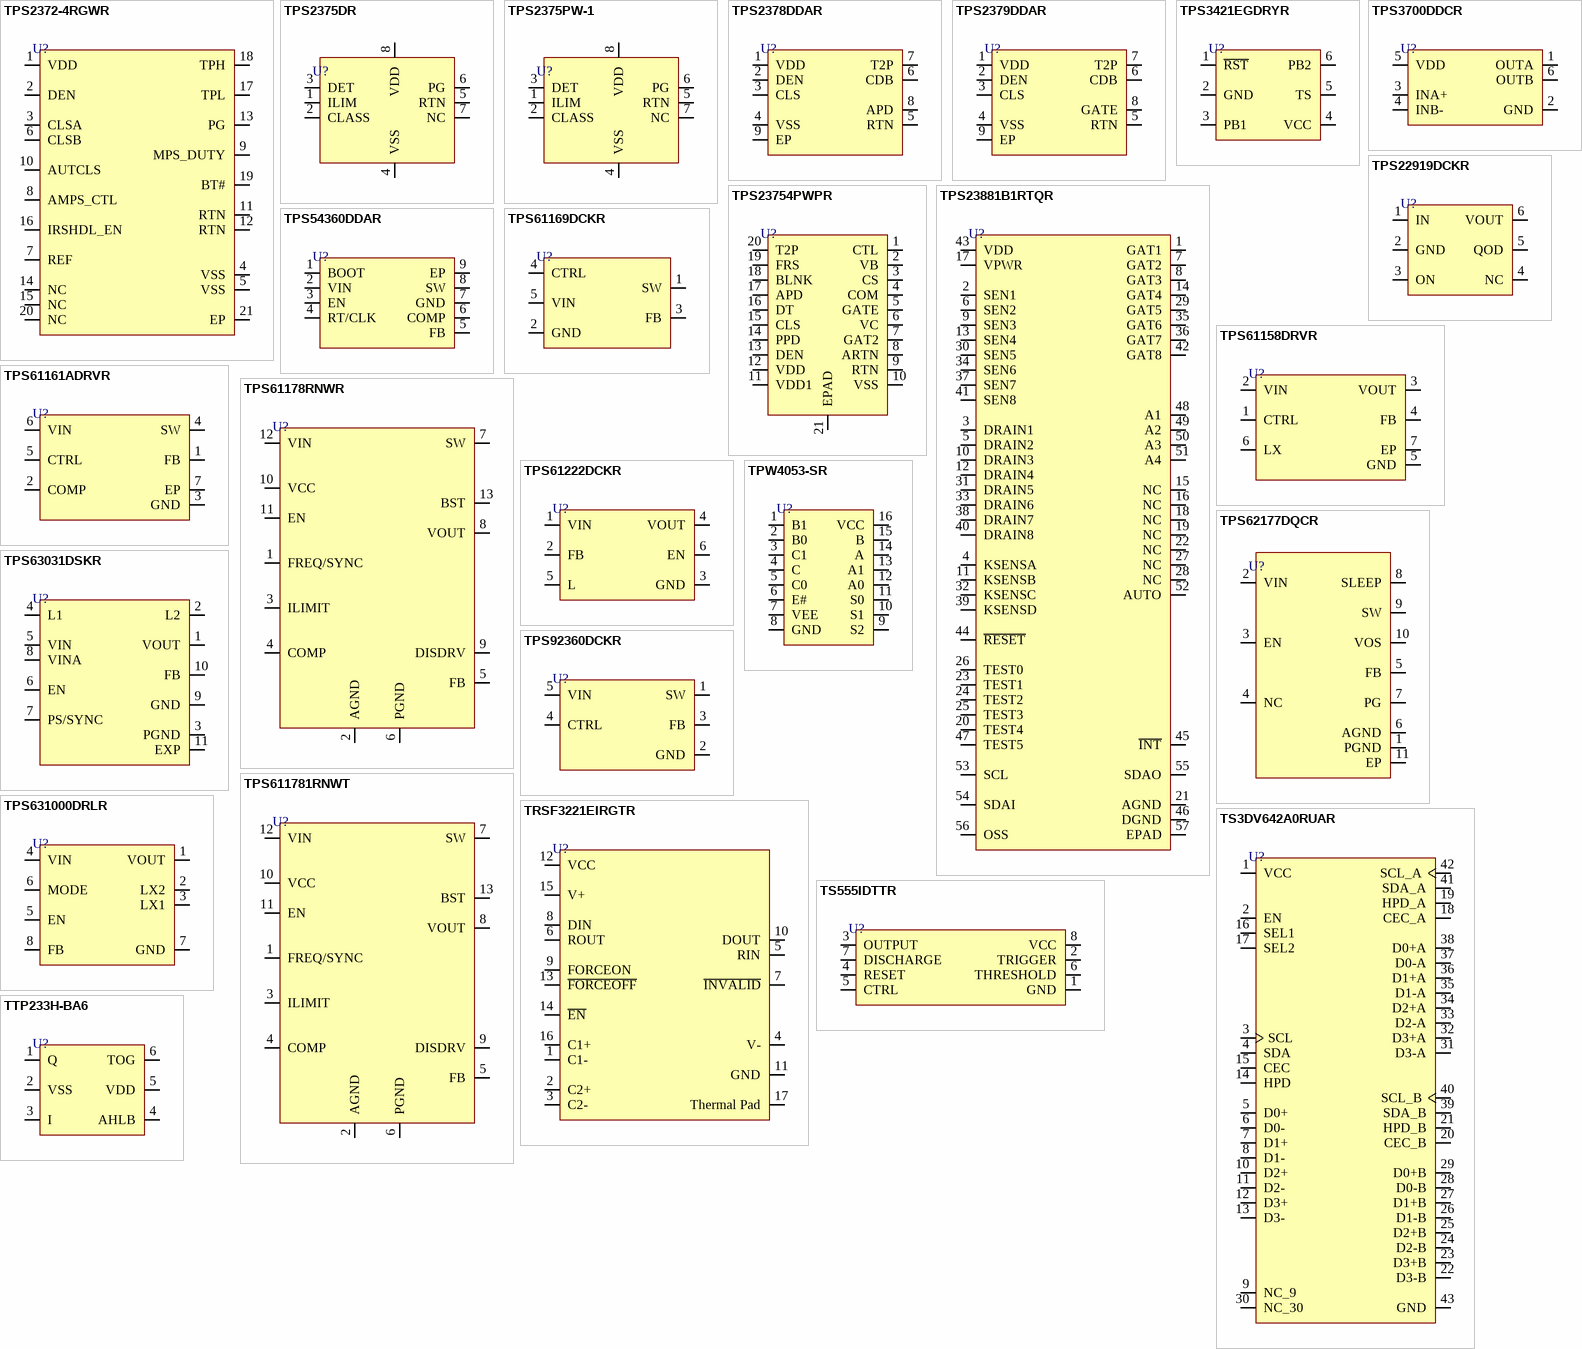
[diagram p20: symbols TPS2372-4RGWR to TTP233H-BA6]

## TPS2372-4RGWR
designator U?
IC POE CNTRL 1 CHANNEL 20VQFN; Manufacturer: Texas Instruments; Manufacturer Part Number: TPS2372-4RGWR; Supplier: Mouser; LCSC Part Number: C470955; RoHS: Yes; Item Type: IC; Stock: 5912; Pricing: 1=3.26, 10=2.78, 50=2.78, 100=2.4, 1000=1.73, 10000=1.54 (USD); ComponentLink1URL: http://www.ti.com/general/docs/suppproductinfo.tsp?distId=10&amp;gotoUrl=http%3A%2F%2Fwww.ti.com%2Flit%2Fgpn%2Ftps2372&src-supplier=Digikey; ComponentLink1Description: http://www.ti.com/general/docs/suppproductinfo.tsp?distId=10&amp;gotoUrl=http%3A%2F%2Fwww.ti.com%2Flit%2Fgpn%2Ftps2372&src-supplier=Digikey; ComponentLink2URL: http://www.ti.com/lit/ds/symlink/tps2372.pdf?src-supplier=Digikey; ComponentLink2Description: http://www.ti.com/lit/ds/symlink/tps2372.pdf?src-supplier=Digikey
footprint VQFN-20-EP(5x5)
pins: 1 VDD, 2 DEN, 3 CLSA, 4 VSS, 5 VSS, 6 CLSB, 7 REF, 8 AMPS_CTL, 9 MPS_DUTY, 10 AUTCLS, 11 RTN, 12 RTN, 13 PG, 14 NC, 15 NC, 16 IRSHDL_EN, 17 TPL, 18 TPH, 19 BT#, 20 NC, 21 EP

## TPS2375DR
designator U?
IC POE CNTRL 1 CHANNEL 8SOIC; Manufacturer: Texas Instruments; Manufacturer Part Number: TPS2375DR; Max Power Dissipation: 12.95W; Operating Supply Current: 240uA; Min Current Limit: 405mA; Output Current: 450mA; Number of Channels: 1; Max Supply Voltage: 57V; Min Supply Voltage: 0V; Power Dissipation: 13W; Supplier 1: Mouser; RoHS: Yes; Category: Interface ICs; Stock 1: 12566; Pricing 1: 1=2.94, 10=2.65, 50=2.5, 100=2.13, 1000=1.45, 10000=1.29 (USD); Case/Package: D; Pins: 8; Weight: 0.002561oz; Min Operating Temperature: -40°C; Max Operating Temperature: 85°C; Packaging: Tape and Reel; Package Quantity: 2500; Series: -; Length: 5mm; Height: 1.58mm; Radiation Hardening: No; Lead Free: Lead Free; RoHS Compliant: Yes; ComponentLink1URL: https://datasheet.ciiva.com/1943/tps2375-1943071.pdf?src-supplier=Digi-Key; ComponentLink1Description: https://datasheet.ciiva.com/1943/tps2375-1943071.pdf?src-supplier=Digi-Key; ComponentLink2URL: https://datasheet.ciiva.com/1943/tps2375-1943070.pdf?src-supplier=Digi-Key; ComponentLink2Description: https://datasheet.ciiva.com/1943/tps2375-1943070.pdf?src-supplier=Digi-Key; ComponentLink3URL: https://datasheet.ciiva.com/1943/tps2375-1943072.pdf?src-supplier=Digi-Key; ComponentLink3Description: https://datasheet.ciiva.com/1943/tps2375-1943072.pdf?src-supplier=Digi-Key; ComponentLink4URL: https://datasheet.ciiva.com/14248/tps2375-14248055.pdf?src-supplier=Avnet; ComponentLink4Description: https://datasheet.ciiva.com/14248/tps2375-14248055.pdf?src-supplier=Avnet; Supplier Part Number 1: 595-TPS2375DR; LCSC Part Number: C2867397; Item Type: IC
footprint SOIC-8
pins: 1 ILIM "Connect a resistor from ILIM to VSS to set the start-up inrush current limit. The equation for calculating the resistor is shown in the detailed pin description section for ILIM.", 2 CLASS "Connect a resistor from CLASS to VSS to set the classification of the powered device  (PD).", 3 DET "Connect a 24.9-k ohm detection resistor from DET to VDD for a valid PD detection.", 4 VSS "Return line on the source side of the TPS2375-1 from the PSE.", 5 RTN "Switched output side return line used as the low-side reference for the TPS2375-1 load.", 6 PG "Open-drain, power-good output; active high.", 7 NC "No connection", 8 VDD "Positive line from the rectified PSE provided input."

## TPS2375PW-1
designator U?
IC POE CNTRL 1 CHANNEL 8TSSOP; Manufacturer: Texas Instruments; Manufacturer Part Number: TPS2375PW-1; Max Supply Voltage: 57V; Min Supply Voltage: 0V; Max Power Dissipation: 12.95W; Output Current: 450mA; Power Dissipation: 13W; Operating Supply Current: 240uA; Min Current Limit: 405mA; Number of Channels: 1; Output Voltage: 400mV; Supplier 1: Mouser; RoHS: Yes; Category: Voltage Regulators - Switching; Stock 1: 340; Pricing 1: 1=2.94, 10=2.64, 50=2.49, 100=2.16, 1000=1.83, 10000=1.51 (USD); Case/Package: TSSOP; Pins: 8; Weight: 0.001376oz; Min Operating Temperature: -40°C; Max Operating Temperature: 85°C; Package Quantity: 150; Series: -; Packaging: Rail/Tube; Length: 3.1mm; Height: 1mm; Radiation Hardening: No; Lead Free: Lead Free; RoHS Compliant: Yes; Reach SVHC Compliant: No; ComponentLink1URL: https://datasheet.ciiva.com/4881/slvs570a-120490-4881281.pdf?src-supplier=Mouser; ComponentLink1Description: https://datasheet.ciiva.com/4881/slvs570a-120490-4881281.pdf?src-supplier=Mouser; ComponentLink2URL: https://datasheet.ciiva.com/15103/getdatasheetpartid-214826-15103993.pdf?src-supplier=Verical; ComponentLink2Description: https://datasheet.ciiva.com/15103/getdatasheetpartid-214826-15103993.pdf?src-supplier=Verical; ComponentLink3URL: https://datasheet.ciiva.com/1941/tps2377-1-1941821.pdf?src-supplier=Digi-Key; ComponentLink3Description: https://datasheet.ciiva.com/1941/tps2377-1-1941821.pdf?src-supplier=Digi-Key; Supplier Part Number 1: 595-TPS2375PW-1; LCSC Part Number: C202190; Item Type: IC
footprint 8-TSSOP (IC SENSOR THERMAL 3.0V 8TSSOP)
pins: 1 ILIM "Connect a resistor from ILIM to VSS to set the start-up inrush current limit. The equation for calculating the resistor is shown in the detailed pin description section for ILIM.", 2 CLASS "Connect a resistor from CLASS to VSS to set the classification of the powered device  (PD).", 3 DET "Connect a 24.9-k ohm detection resistor from DET to VDD for a valid PD detection.", 4 VSS "Return line on the source side of the TPS2375-1 from the PSE.", 5 RTN "Switched output side return line used as the low-side reference for the TPS2375-1 load.", 6 PG "Open-drain, power-good output; active high.", 7 NC "No connection", 8 VDD "Positive line from the rectified PSE provided input."

## TPS2378DDAR
designator U?
IEEE 802.3at PoE High-Power PD interface with AUX Control 8-SO PowerPAD -40 to 85; Manufacturer: Texas Instruments; Manufacturer Part Number: TPS2378DDAR; Item Type: IC; Supplier: Mouser; Supplier Part Number: 595-TPS2378DDAR; RoHS: Yes; Category: Interface ICs; Stock: 2078; Pricing: 1=1.61, 10=1.08, 50=1.08, 100=0.955, 1000=0.801, 10000=0.664 (USD); Width: 3.9mm; Thickness: 1.48mm; Lead Free: 5697LeadFree; ComponentLink1URL: https://datasheet.ciiva.com/6632/tps2378-6632081.pdf?src-supplier=Digikey; ComponentLink1Description: https://datasheet.ciiva.com/6632/tps2378-6632081.pdf?src-supplier=Digikey; ComponentLink2URL: https://datasheet.ciiva.com/26931/getdatasheetpartid-621225-26931136.pdf?src-supplier=Verical; ComponentLink2Description: https://datasheet.ciiva.com/26931/getdatasheetpartid-621225-26931136.pdf?src-supplier=Verical; LCSC Part Number: C337500
footprint 8-SO PowerPad
pins: 1 VDD "Connect a 24.9-k ohm detection resistor from DET to VDD for a valid PD detection.", 2 DEN "Connect a resistor from CLASS to VSS to set the classification of the powered device  (PD).", 3 CLS "Positive line from the rectified PSE provided input.", 4 VSS "Return line on the source side of the TPS2375-1 from the PSE.", 5 RTN "Switched output side return line used as the low-side reference for the TPS2375-1 load.", 6 CDB "Open-drain, power-good output; active high.", 7 T2P "No connection", 8 APD "Connect a resistor from ILIM to VSS to set the start-up inrush current limit. The equation for calculating the resistor is shown in the detailed pin description section for ILIM.", 9 EP "Switched output side return line used as the low-side reference for the TPS2375-1 load."

## TPS2379DDAR
designator U?
IEEE 802.3at PoE High-Power PD interface with external gate driver 8-SO PowerPAD -40 to 85; Manufacturer: Texas Instruments; Manufacturer Part Number: TPS2379DDAR; Item Type: IC; Supplier: Mouser; Supplier Part Number: 595-TPS2379DDAR; RoHS: Yes; Category: Integrated Circuits (ICs); Stock: 6577; Pricing: 1=1.72, 10=1.13, 50=1.13, 100=1.03, 1000=1.03, 10000=0.952 (USD); ComponentLink1URL: https://datasheet.ciiva.com/12220/slvsb98-121084-12220337.pdf?src-supplier=Mouser; ComponentLink1Description: https://datasheet.ciiva.com/12220/slvsb98-121084-12220337.pdf?src-supplier=Mouser; ComponentLink2URL: https://datasheet.ciiva.com/26931/getdatasheetpartid-621226-26931138.pdf?src-supplier=Verical; ComponentLink2Description: https://datasheet.ciiva.com/26931/getdatasheetpartid-621226-26931138.pdf?src-supplier=Verical; ComponentLink3URL: https://datasheet.ciiva.com/6636/tps2379-6636296.pdf?src-supplier=Digikey; ComponentLink3Description: https://datasheet.ciiva.com/6636/tps2379-6636296.pdf?src-supplier=Digikey; ComponentLink4URL: https://datasheet.ciiva.com/14248/tps2379-14248471.pdf?src-supplier=Avnet; ComponentLink4Description: https://datasheet.ciiva.com/14248/tps2379-14248471.pdf?src-supplier=Avnet; LCSC Part Number: C140293; Package: 8-SO PowerPad
footprint SOIC-8-EP
pins: 1 VDD "Connect a 24.9-k ohm detection resistor from DET to VDD for a valid PD detection.", 2 DEN "Connect a resistor from CLASS to VSS to set the classification of the powered device  (PD).", 3 CLS "Positive line from the rectified PSE provided input.", 4 VSS "Return line on the source side of the TPS2375-1 from the PSE.", 5 RTN "Switched output side return line used as the low-side reference for the TPS2375-1 load.", 6 CDB "Open-drain, power-good output; active high.", 7 T2P "No connection", 8 GATE "Connect a resistor from ILIM to VSS to set the start-up inrush current limit. The equation for calculating the resistor is shown in the detailed pin description section for ILIM.", 9 EP "Switched output side return line used as the low-side reference for the TPS2375-1 load."

## TPS3421EGDRYR
designator U?
IC SUPERVISOR 2 CHANNEL 6SON; Manufacturer: Texas Instruments; Manufacturer Part Number: TPS3421EGDRYR; Supplier: Digikey; LCSC Part Number: C2067262; RoHS: Yes; Item Type: IC; Stock: 11931; Pricing: 1=1.12, 10=0.811, 25=0.7332, 100=0.6475, 250=0.6066, 500=0.58194, 1000=0.56164, 2500=0.5402 (USD); ComponentLink1URL: http://components.arrow.com/part/dataview/56191445S506834N7713?src-supplier=Arrow+Electronics; ComponentLink1Description: http://components.arrow.com/part/dataview/56191445S506834N7713?src-supplier=Arrow+Electronics; ComponentLink2URL: http://www.ti.com/lit/gpn/tps3421?src-supplier=Mouser; ComponentLink2Description: http://www.ti.com/lit/gpn/tps3421?src-supplier=Mouser; ComponentLink3URL: http://www.ti.com/lit/ds/symlink/tps3420.pdf?src-supplier=Digikey; ComponentLink3Description: http://www.ti.com/lit/ds/symlink/tps3420.pdf?src-supplier=Digikey; ComponentLink4URL: http://www.ti.com/general/docs/suppproductinfo.tsp?distId=10&amp;gotoUrl=http%3A%2F%2Fwww.ti.com%2Flit%2Fgpn%2Ftps3420&src-supplier=Digikey; ComponentLink4Description: http://www.ti.com/general/docs/suppproductinfo.tsp?distId=10&amp;gotoUrl=http%3A%2F%2Fwww.ti.com%2Flit%2Fgpn%2Ftps3420&src-supplier=Digikey; ComponentLink5URL: http://www.ti.com/general/docs/lit/getliterature.tsp?genericPartNumber=TPS3422&&fileType=pdf&src-supplier=Avnet; ComponentLink5Description: http://www.ti.com/general/docs/lit/getliterature.tsp?genericPartNumber=TPS3422&&fileType=pdf&src-supplier=Avnet
footprint 6-SON (1.45x1)
pins: 1 ~{RST}, 2 GND, 3 PB1, 4 VCC, 5 TS, 6 PB2

## TPS3700DDCR
designator U?
IC COMPARATOR 2 WINDW SOT23-THIN; Manufacturer: Texas Instruments; Manufacturer Part Number: TPS3700DDCR; Min Supply Voltage: 1.8V; Max Supply Voltage: 18V; Number of Elements: 2; Quiescent Current: 11uA; Propagation Delay: 29us; Hysteresis: 5.5mV; Number of Channels: 1; Nominal Supply Current: 7uA; Undervoltage Threshold: 1.7V; Operating Supply Current: 5.5uA; Watchdog Timer: No; Supplier 1: Mouser; RoHS: Yes; Item Type: IC; Pricing 1: 1=2.75000, 10=2.48000, 25=2.34000, 50=2.34000, 100=2.00000, 250=1.87000, 500=1.64000, 1000=1.36000, 3000=1.35000, 10000=1.35000 (USD); LCSC Part Number: C33002; Case/Package: SOT; Number of Pins: 6; Min Operating Temperature: -40°C; Max Operating Temperature: 125°C; Packaging: Tape and Reel; Package Quantity: 3000; Number of Voltages Monitored: 2; Series: TPS3700; Supply Current: 7uA; Radiation Hardening: No; Lead Free: Lead Free; RoHS Compliant: Yes; REACH SVHC: No SVHC; ComponentLink1URL: https://datasheet.ciiva.com/15106/getdatasheetpartid-496993-15106246.pdf?src-supplier=Verical; ComponentLink1Description: https://datasheet.ciiva.com/15106/getdatasheetpartid-496993-15106246.pdf?src-supplier=Verical; ComponentLink2URL: https://datasheet.ciiva.com/22693/1882693-22693543.pdf?src-supplier=Element14; ComponentLink2Description: https://datasheet.ciiva.com/22693/1882693-22693543.pdf?src-supplier=Element14; ComponentLink3URL: https://datasheet.ciiva.com/6625/tps3700-6625126.pdf?src-supplier=Digi-Key; ComponentLink3Description: https://datasheet.ciiva.com/6625/tps3700-6625126.pdf?src-supplier=Digi-Key; ComponentLink4URL: https://datasheet.ciiva.com/6625/tps3700-6625125.pdf?src-supplier=Digi-Key; ComponentLink4Description: https://datasheet.ciiva.com/6625/tps3700-6625125.pdf?src-supplier=Digi-Key; ComponentLink5URL: https://datasheet.ciiva.com/6625/tps3700-6625129.pdf?src-supplier=Digi-Key; ComponentLink5Description: https://datasheet.ciiva.com/6625/tps3700-6625129.pdf?src-supplier=Digi-Key; ComponentLink6URL: https://datasheet.ciiva.com/14204/tps3700-14204199.pdf?src-supplier=Avnet; ComponentLink6Description: https://datasheet.ciiva.com/14204/tps3700-14204199.pdf?src-supplier=Avnet; Supplier Part Number 1: 595-TPS3700DDCR
footprint SOT-23-6 (IC BAT CHG LI-ION 1 CELL SOT23-6)
pins: 1 OUTA, 2 GND, 3 INA+, 4 INB-, 5 VDD, 6 OUTB

## TPS22919DCKR
designator U?
5.5V 1.5A 90mΩ Controlled Rise Time Self-Protecting Load Switch; Manufacturer: Texas Instruments; Manufacturer Part Number: TPS22919DCKR; Item Type: IC; Fall Time: 10us; Min Supply Voltage: 1.6V; Nominal Supply Current: 8uA; Number of Drivers: 1NUMBER; Rise Time: 750us; Turn-Off Delay Time: 6us; Turn-On Delay Time: 1.5ms; Supplier: Digikey; LCSC Part Number: C2149796; RoHS: Yes; Stock: 134665; Pricing: 1=0.18, 10=0.122, 25=0.1072, 100=0.0911, 250=0.08344, 500=0.07882, 1000=0.07503 (USD); Pins: 6NUMBER; Max Supply Voltage: 5.5V; Output Current: 1.5A; Length: 2mm; Width: 1.25mm; Height: 1.1mm; Thickness: 900um; ComponentLink1URL: http://www.ti.com/general/docs/suppproductinfo.tsp?distId=10&amp;gotoUrl=http%3A%2F%2Fwww.ti.com%2Flit%2Fgpn%2Ftps22919&src-supplier=Digikey; ComponentLink1Description: http://www.ti.com/general/docs/suppproductinfo.tsp?distId=10&amp;gotoUrl=http%3A%2F%2Fwww.ti.com%2Flit%2Fgpn%2Ftps22919&src-supplier=Digikey
footprint SC-70-6
pins: 1 IN, 2 GND, 3 ON, 4 NC, 5 QOD, 6 VOUT

## TPS23754PWPR
designator U?
IC POE CNTRL 1 CHANNEL 20HTSSOP; Manufacturer: Texas Instruments; Manufacturer Part Number: TPS23754PWPR; Supplier: Mouser; LCSC Part Number: C181651; RoHS: Yes; Item Type: IC; Stock: 2493; Pricing: 1=2.7, 10=2.35, 50=2.35, 100=2.02, 1000=1.48, 10000=1.3 (USD); ComponentLink1URL: https://datasheet.ciiva.com/15104/getdatasheetpartid-256403-15104033.pdf?src-supplier=Verical; ComponentLink1Description: https://datasheet.ciiva.com/15104/getdatasheetpartid-256403-15104033.pdf?src-supplier=Verical; ComponentLink2URL: https://datasheet.ciiva.com/3242/tps23754-1-3242976.pdf?src-supplier=Avnet; ComponentLink2Description: https://datasheet.ciiva.com/3242/tps23754-1-3242976.pdf?src-supplier=Avnet; ComponentLink3URL: https://datasheet.ciiva.com/1943/tps23754-1943176.pdf?src-supplier=Digikey; ComponentLink3Description: https://datasheet.ciiva.com/1943/tps23754-1943176.pdf?src-supplier=Digikey
footprint HTSSOP-20-EP
pins: 1 CTL, 2 VB, 3 CS, 4 COM, 5 GATE, 6 VC, 7 GAT2, 8 ARTN, 9 RTN, 10 VSS, 11 VDD1, 12 VDD, 13 DEN, 14 PPD, 15 CLS, 16 DT, 17 APD, 18 BLNK, 19 FRS, 20 T2P, 21 EPAD

## TPS23881B1RTQR
designator U?
TYPE-4, FOUR-PAIR, 8-CHANNEL POE; Manufacturer: Texas Instruments; Manufacturer Part Number: TPS23881B1RTQR; Item Type: IC; Supplier: DigiKey; Supplier Part Number: 296-TPS23881B1RTQRTR-ND; Pricing: 2000=4.40512 (USD)
footprint 56-VQFN (8x8)
pins: 1 GAT1, 2 SEN1, 3 DRAIN1, 4 KSENSA, 5 DRAIN2, 6 SEN2, 7 GAT2, 8 GAT3, 9 SEN3, 10 DRAIN3, 11 KSENSB, 12 DRAIN4, 13 SEN4, 14 GAT4, 15 NC, 16 NC, 17 VPWR, 18 NC, 19 NC, 20 TEST4, 21 AGND, 22 NC, 23 TEST1, 24 TEST2, 25 TEST3, 26 TEST0, 27 NC, 28 NC, 29 GAT5, 30 SEN5, 31 DRAIN5, 32 KSENSC, 33 DRAIN6, 34 SEN6, 35 GAT6, 36 GAT7, 37 SEN7, 38 DRAIN7, 39 KSENSD, 40 DRAIN8, 41 SEN8, 42 GAT8, 43 VDD, 44 ~{RESET}, 45 ~{INT}, 46 DGND, 47 TEST5, 48 A1, 49 A2, 50 A3, 51 A4, 52 AUTO, 53 SCL, 54 SDAI, 55 SDAO, 56 OSS, 57 EPAD

## TPS54360DDAR
designator U?
IC REG BCK SPLIT RAIL ADJ 8SOPWR; Manufacturer: Texas Instruments; Manufacturer Part Number: TPS54360DDAR; Supplier: Mouser; LCSC Part Number: C44377; RoHS: Yes; Item Type: IC; Stock: 2440; Pricing: 1=4.37, 10=3.05, 50=3.05, 100=2.76, 1000=2.47, 10000=2.31 (USD); ComponentLink1URL: https://datasheet.ciiva.com/12221/tps54360-109421-12221526.pdf?src-supplier=Mouser; ComponentLink1Description: https://datasheet.ciiva.com/12221/tps54360-109421-12221526.pdf?src-supplier=Mouser; ComponentLink2URL: https://datasheet.ciiva.com/14833/2976tps54360-14833745.pdf?src-supplier=Arrow+Electronics; ComponentLink2Description: https://datasheet.ciiva.com/14833/2976tps54360-14833745.pdf?src-supplier=Arrow+Electronics; ComponentLink3URL: https://datasheet.ciiva.com/14377/tps54360-14377976.pdf?src-supplier=Avnet; ComponentLink3Description: https://datasheet.ciiva.com/14377/tps54360-14377976.pdf?src-supplier=Avnet; ComponentLink4URL: https://datasheet.ciiva.com/41798/tps54360-41798794.pdf?src-supplier=Digikey; ComponentLink4Description: https://datasheet.ciiva.com/41798/tps54360-41798794.pdf?src-supplier=Digikey
footprint 8-SO PowerPad
pins: 1 BOOT, 2 VIN, 3 EN, 4 RT/CLK, 5 FB, 6 COMP, 7 GND, 8 SW, 9 EP

## TPS61158DRVR
designator U?
IC LED DRVR RGLTR PWM 30MA 6WSON; Manufacturer: Texas Instruments; Manufacturer Part Number: TPS61158DRVR; Supplier: Mouser; LCSC Part Number: C702280; RoHS: Yes; Item Type: IC; Stock: 6942; Pricing: 1=0.81, 10=0.594, 50=0.594, 100=0.489, 1000=0.446, 10000=0.4 (USD); ComponentLink1URL: https://datasheet.ciiva.com/26932/getdatasheetpartid-782062-26932814.pdf?src-supplier=Verical; ComponentLink1Description: https://datasheet.ciiva.com/26932/getdatasheetpartid-782062-26932814.pdf?src-supplier=Verical; ComponentLink2URL: https://datasheet.ciiva.com/24016/slvsbr3-261171-24016309.pdf?src-supplier=Mouser; ComponentLink2Description: https://datasheet.ciiva.com/24016/slvsbr3-261171-24016309.pdf?src-supplier=Mouser; ComponentLink3URL: https://datasheet.ciiva.com/18569/tps61158-18569084.pdf?src-supplier=Digikey; ComponentLink3Description: https://datasheet.ciiva.com/18569/tps61158-18569084.pdf?src-supplier=Digikey
footprint WSON-6-EP(2x2)
pins: 1 CTRL, 2 VIN, 3 VOUT, 4 FB, 5 GND, 6 LX, 7 EP

## TPS61161ADRVR
designator U?
IC LED DRV RGLTR PWM 700MA 6WSON; Manufacturer: Texas Instruments; Manufacturer Part Number: TPS61161ADRVR; Supplier: Mouser; Supplier Part Number: 595-TPS61161ADRVR; RoHS: Yes; Category: LED Drivers; Stock: 3931; Pricing: 1=1.35, 10=0.864, 50=0.864, 100=0.696, 1000=0.618, 10000=0.53 (USD); Length: 2mm; Width: 2mm; Height: 800um; Thickness: 750um; Lead Free: 5697LeadFree; ComponentLink1URL: https://datasheet.ciiva.com/15135/getdatasheetpartid-621302-15135612.pdf?src-supplier=Verical; ComponentLink1Description: https://datasheet.ciiva.com/15135/getdatasheetpartid-621302-15135612.pdf?src-supplier=Verical; ComponentLink2URL: https://datasheet.ciiva.com/12277/slvs937a-120933-12277974.pdf?src-supplier=Mouser; ComponentLink2Description: https://datasheet.ciiva.com/12277/slvs937a-120933-12277974.pdf?src-supplier=Mouser; ComponentLink3URL: https://datasheet.ciiva.com/1947/tps61161a-1947723.pdf?src-supplier=Digikey; ComponentLink3Description: https://datasheet.ciiva.com/1947/tps61161a-1947723.pdf?src-supplier=Digikey; ComponentLink4URL: https://datasheet.ciiva.com/1947/tps61161a-1947724.pdf?src-supplier=Digikey; ComponentLink4Description: https://datasheet.ciiva.com/1947/tps61161a-1947724.pdf?src-supplier=Digikey; ComponentLink5URL: https://datasheet.ciiva.com/1947/tps61161a-1947725.pdf?src-supplier=Digikey; ComponentLink5Description: https://datasheet.ciiva.com/1947/tps61161a-1947725.pdf?src-supplier=Digikey; ComponentLink6URL: https://datasheet.ciiva.com/3165/tps61161a-3165623.pdf?src-supplier=Avnet; ComponentLink6Description: https://datasheet.ciiva.com/3165/tps61161a-3165623.pdf?src-supplier=Avnet
footprint WSON-6-EP(2x2)
pins: 1 FB, 2 COMP, 3 GND, 4 SW, 5 CTRL, 6 VIN, 7 EP

## TPS61169DCKR
designator U?
IC LED DRV RGLTR PWM 1.8A SC70-5; Manufacturer: Texas Instruments; Manufacturer Part Number: TPS61169DCKR; Min Supply Voltage: 2.7V; Nominal Supply Current: 300uA; Supplier: Mouser; LCSC Part Number: C71045; RoHS: Yes; Item Type: IC; Stock: 3338; Pricing: 1=0.87, 10=0.748, 50=0.748, 100=0.577, 1000=0.403, 10000=0.343 (USD); Thickness: 900um; ComponentLink1URL: http://www.ti.com/general/docs/lit/getliterature.tsp?genericPartNumber=TPS61169&&fileType=pdf&src-supplier=Element14; ComponentLink1Description: http://www.ti.com/general/docs/lit/getliterature.tsp?genericPartNumber=TPS61169&&fileType=pdf&src-supplier=Element14; ComponentLink2URL: http://www.ti.com/lit/gpn/tps61169?src-supplier=Mouser; ComponentLink2Description: http://www.ti.com/lit/gpn/tps61169?src-supplier=Mouser; ComponentLink3URL: http://www.ti.com/general/docs/lit/getliterature.tsp?genericPartNumber=TPS61169&amp;&amp;fileType=pdf&src-supplier=Farnell; ComponentLink3Description: http://www.ti.com/general/docs/lit/getliterature.tsp?genericPartNumber=TPS61169&amp;&amp;fileType=pdf&src-supplier=Farnell; ComponentLink4URL: http://www.ti.com/general/docs/lit/getliterature.tsp?genericPartNumber=TPS61169&&fileType=pdf&src-supplier=Avnet; ComponentLink4Description: http://www.ti.com/general/docs/lit/getliterature.tsp?genericPartNumber=TPS61169&&fileType=pdf&src-supplier=Avnet; ComponentLink5URL: http://www.ti.com/lit/ds/symlink/tps61169.pdf?src-supplier=Digikey; ComponentLink5Description: http://www.ti.com/lit/ds/symlink/tps61169.pdf?src-supplier=Digikey
footprint SC70-5
pins: 1 SW, 2 GND, 3 FB, 4 CTRL, 5 VIN